# Altium footprint library PCB_IntegratedCircuit.PcbLib: 62 footprints (part 3 of 4)
Each footprint in its own frame and in the unit in brackets; x right, y up, seen from the top. Pads: shape width x height; smd on the part's side, far side on the other; paste and mask are expansions set on the pad; w line width, h text height; cw(c..) or ccw(c..) is an arc to the next point about the centre after c.
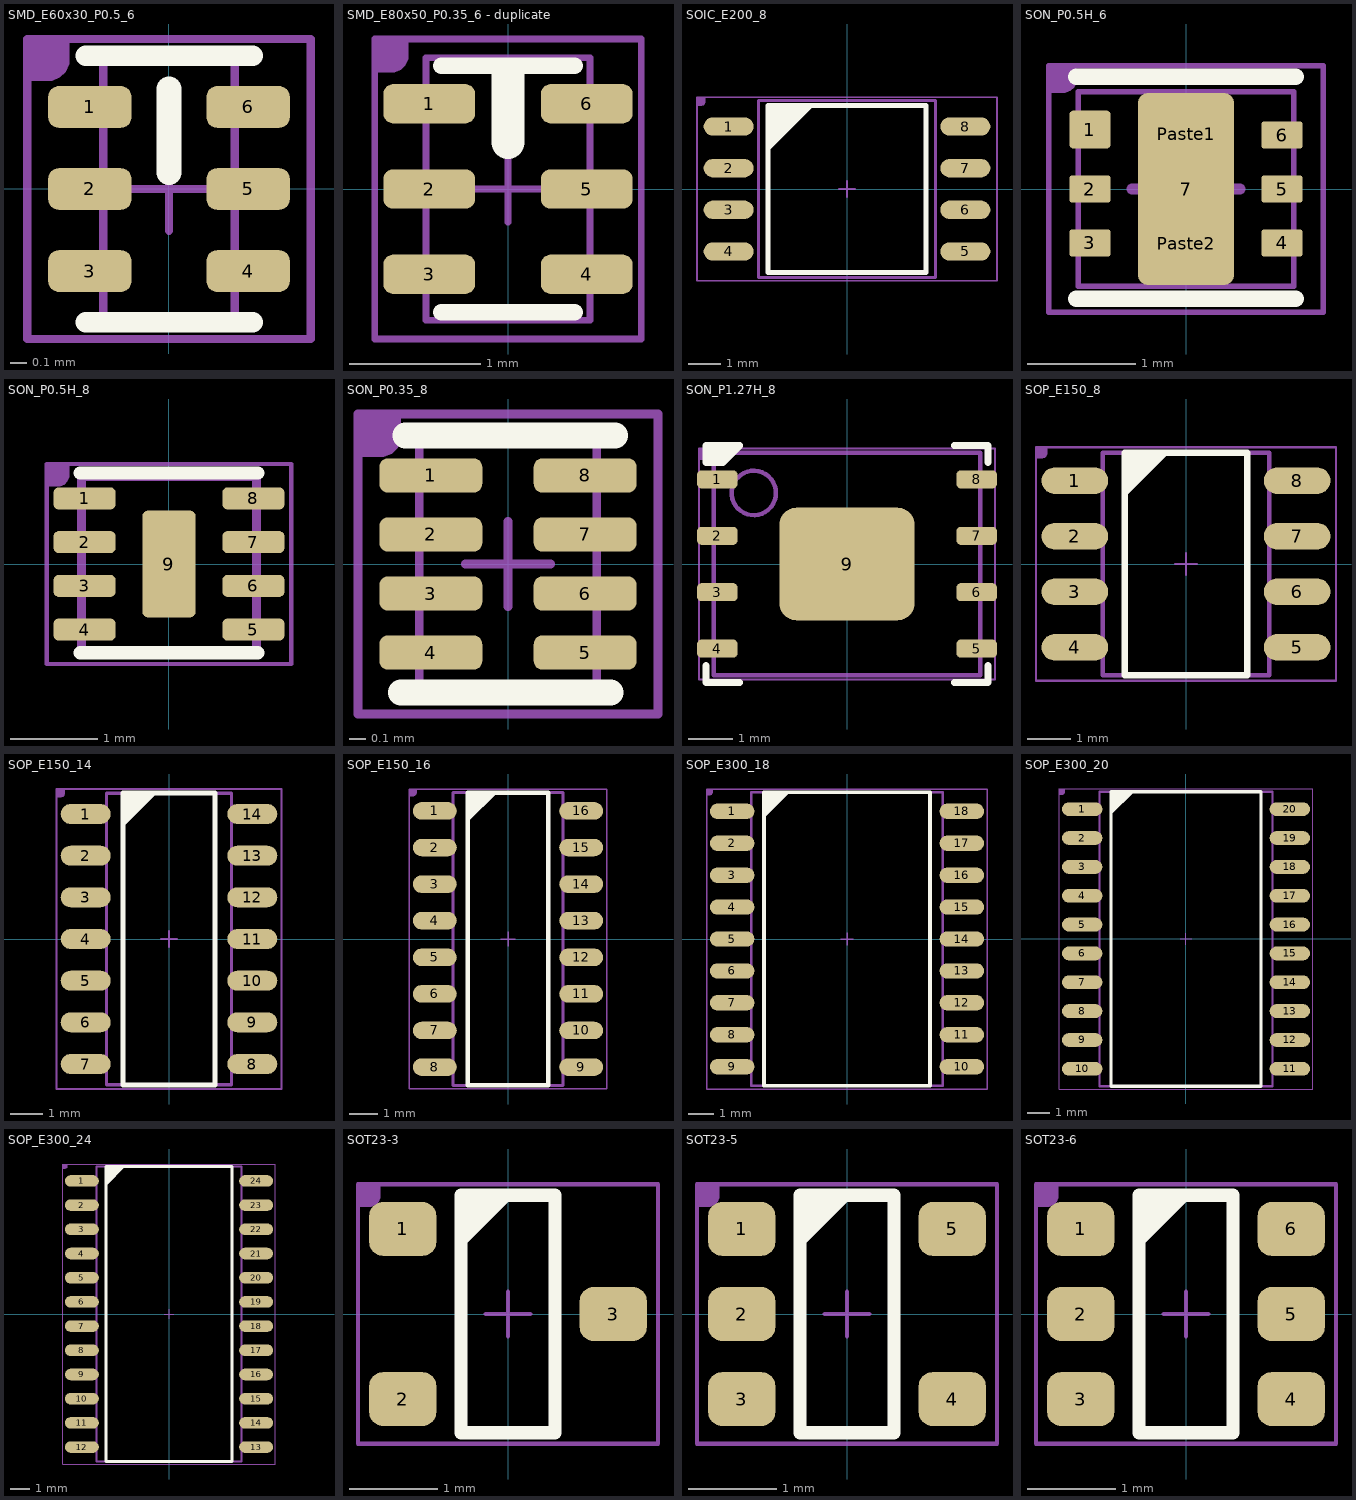
[diagram p2: the footprints below, top view; thin cyan lines are the x and y axes]

## SMD_E60x30_P0.5_6 [mil]
pads (6):
  rrect50% 20x10 smd: 1(-19,19.69) 2(-19,0) 3(-19,-19.68) 4(19,-19.68) 5(19,0) 6(19,19.69)
Top Overlay:
  lines w5: -20,-32 20,-32 ; -20,32 20,32
  lines w6: 0,4 0,24
Mechanical 13:
  lines w2: -10,0 10,0 ; 0,-10 0,10 ; 15.75,-31.5 15.75,31.5 -15.75,31.5 -15.75,-31.5 15.75,-31.5 ; 15.75,-31.5 15.75,-31.5
T-Component:
  region: -34,36 -24,36 -24,31 -24,30.01 -24.76,28.17 -26.17,26.76 -28.01,26 -29,26 -34,26
  lines w2: -34,-36 -34,36 34,36 34,-36 -34,-36
  text ".Designator" at -25,-15 h60
3D body: height 24.41, standoff 0, extent -15.95,-23.62 -10.04,-15.74
3D body: height 24.41, standoff 0, extent -1.38,15.75 1.77,23.63
3D body: height 24.41, standoff 0, extent 10.42,15.75 16.33,23.62
3D body: height 24.41, standoff 0, extent 10.42,-3.94 16.33,3.94
3D body: height 24.41, standoff 0, extent 10.42,-23.62 16.33,-15.75
3D body: height 24.41, standoff 0, extent -15.95,-3.93 -10.04,3.94
3D body: height 24.41, standoff 0, extent -15.95,15.76 -10.04,23.63
3D body: height 23.62, standoff 0, extent -15.75,-31.49 15.74,31.5

## SMD_E80x50_P0.35_6 - duplicate [mm]
pads (6):
  rrect50% 0.7x0.3 smd mask+0.05: 1(-0.6,0.65) 2(-0.6,0) 3(-0.6,-0.65) 4(0.6,-0.65) 5(0.6,0) 6(0.6,0.65)
Top Overlay:
  lines w0.127: -0.508,-0.94 0.508,-0.94 ; -0.508,0.94 0.508,0.94
  lines w0.254: 0,0.356 0,0.864
Mechanical 13:
  lines w0.051: -0.625,-1 0.625,-1 0.625,1 ; -0.254,0 0.254,0 ; 0,-0.254 0,0.254 ; -0.625,1 -0.625,-1 -0.625,1 ; -0.625,1 0.625,1 ; -0.625,1 0.625,1
T-Component:
  region: -1.016,1.143 -0.762,1.143 -0.762,1.016 -0.762,0.991 -0.781,0.944 -0.817,0.908 -0.864,0.889 -0.889,0.889 -1.016,0.889
  lines w0.051: -1.016,-1.143 -1.016,1.143 1.016,1.143 1.016,-1.143 -1.016,-1.143
  text ".Designator" at -0.635,-0.381 h1.52
3D body "User Library-1600BL15B100E.STEP": height 0.87, standoff 0.01, extent -0.635,-1 0.635,1

## SOIC_E200_8 [mil]
height 85.04
pads (8):
  oval 60x22 smd: 1(-142,75) 2(-142,25) 3(-142,-25) 4(-142,-75) 5(142,-75) 6(142,-25) 7(142,25) 8(142,75)
Top Overlay:
  region: -95,100 -40,100 -95,45
  lines w6: -95,-100 95,-100 95,100 -95,100 -95,-100
Mechanical 13:
  lines w2: -10,0 10,0 ; 0,-10 0,10
  lines w4: -106.3,-106.3 106.3,-106.3 106.3,106.3 -106.3,106.3 -106.3,-106.3
T-Component:
  region: -180,110 -170,110 -170,105 -170,104.01 -170.76,102.17 -172.17,100.76 -174.01,100 -175,100 -180,100
  lines w2: -180,-110 -180,110 180,110 180,-110 -180,-110
  text ".Designator" at -41,-25 h100
3D body "User Library-SOIC-8-208.STEP": height 84.37, standoff -0.28, extent -161.42,-106.29 161.42,106.3

## SON_P0.5H_6 [mil]
height 39.37
pads (9):
  rrect20% 15x13.78 smd: 1(-35,21.65)
  rrect20% 15x10 smd: 2(-35,0) 3(-35,-19.69) 4(35,-19.69) 5(35,0) 6(35,19.68)
  rrect20% 35x70 smd paste-100: 7(0,0)
  rrect20% 30x15 on Top Paste mask+1.97: Paste1(0,20) Paste2(0,-20)
Top Overlay:
  lines w6: -40,-40 40,-40 ; -40,41 40,41
Top Solder:
  region: -43,19.69 -43,-19.68 -27,-19.68 -27,19.69
  region: 27,19.69 27,-19.68 43,-19.68 43,19.69
Mechanical 13:
  lines w2: -39.37,-35.43 -39.37,35.43 39.37,35.43 39.37,-35.43 -39.37,-35.43
T-Component:
  region: -50,45 -40,45 -40,40 -40,39.01 -40.76,37.17 -42.17,35.76 -44.01,35 -45,35 -50,35
  lines w1.97: -50,-45 -50,45 50,45 50,-45 -50,-45
  text ".Designator" at -41,-25 h100
B-Component:
  lines w3.94: -19.68,0 19.69,0 ; 0,-19.69 0,19.68
3D body "PSON50P200X100_HS-7N.step": height 39.37, standoff -0.04, extent -39.41,-35.43 39.41,35.43

## SON_P0.5H_8 [mil] "SON, 8-Leads, Body 2.00x2.00mm, Pitch"
height 35.43
pads (9):
  rrect50% 28x10 smd mask+2: 1(-38,29.53) 2(-38,9.84) 3(-38,-9.84) 4(-38,-29.53) 5(38,-29.53) 6(38,-9.84) 7(38,9.84) 8(38,29.53)
  rrect20% 24x48 smd mask+2: 9(0,0)
Top Overlay:
  lines w6: -40,-40 40,-40 ; -40,41 40,41
Top Solder:
  region: -52,29.53 -52,-29.53 -24,-29.53 -24,29.53
  region: 52,-29.53 52,29.53 24,29.53 24,-29.53
Mechanical 13:
  lines w2: -10,0 10,0 ; 0,-10 0,10
  lines w3.94: -39.37,-39.37 -39.37,39.37 39.37,39.37 39.37,-39.37 -39.37,-39.37
T-Component:
  region: -55,45 -45,45 -45,40 -45,39.01 -45.76,37.17 -47.17,35.76 -49.01,35 -50,35 -55,35
  lines w1.97: -55,-45 55,-45 55,45 -55,45 -55,-45
  text ".Designator" at -41,-25 h100
3D body "SON50P200X90_HS-9L.step": height 35.43, standoff -0.04, extent -39.41,-39.37 39.41,39.37

## SON_P0.35_8 [mil] "SON, 8-Leads, Body 1.40x1.00mm, Pitch 0.35mm, IPC High Density"
height 15.75
pads (8):
  rrect50% 24x8 smd: 1(-18,20.67) 2(-18,6.89) 3(-18,-6.89) 4(-18,-20.67) 5(18,-20.67) 6(18,-6.89) 7(18,6.89) 8(18,20.67)
Top Layer:
  region: -18,20.67
Top Overlay:
  lines w6: -25,-30 24,-30 ; -24,30 25,30
Top Solder:
  region: -30,20.67 -6,20.67 -6,-20.67 -30,-20.67
  region: 6,20.67 30,20.67 30,-20.67 6,-20.67
Mechanical 13:
  lines w2: -10,0 10,0 ; 0,-10 0,10 ; -20.67,-28.54 -20.67,28.54 20.67,28.54 20.67,-28.54 -20.67,-28.54
T-Component:
  region: -35,35 -25,35 -25,30 -25,29.01 -25.76,27.17 -27.17,25.76 -29.01,25 -30,25 -35,25
  lines w2: -35,-35 35,-35 35,35 -35,35 -35,-35
  text ".Designator" at -25.76,-16 h60
3D body "SON35P100X40-8L.step": height 15.75, standoff 0, extent -22.64,-28.54 22.64,28.54

## SON_P1.27H_8 [mil] "SON, 8-Leads, Body 5.00x6.00mm, Pitch 1.27mm, Thermal Pad 3.40x4.30mm, IPC High Density"
height 29.53
pads (9):
  rrect50% 36x16 smd: 1(-115,75) 2(-115,25) 3(-115,-25) 4(-115,-75) 5(115,-75) 6(115,-25) 7(115,25) 8(115,75)
  rrect30% 120x100 smd paste-84.65: 9(0,0)
Top Overlay:
  region: -125,105 -95,105 -110,90 -125,90
  lines w6: -125,-90 -125,-105 -95,-105 ; 95,-105 125,-105 125,-90 ; 95,105 125,105 125,90 ; -125,90 -110,90 -95,105 -125,105 -125,90
Top Paste:
  rectangle: -24.21,-18.31 24.21,18.31
Mechanical 13:
  circle w3.94: c-82.68,62.99 r19.68
  lines w4: -19.68,0 19.69,0 ; 0,-19.68 0,19.68 ; -118.11,-98.43 118.11,-98.43 118.11,98.43 -118.11,98.43 -118.11,-98.43
T-Component:
  region: -131.3,102.36 -121.3,102.36 -121.3,97.36 -121.3,96.37 -122.06,94.53 -123.47,93.12 -125.3,92.36 -126.3,92.36 -131.3,92.36
  lines w2: -131.3,-102.36 131.3,-102.36 131.3,102.36 -131.3,102.36 -131.3,-102.36
  text ".Designator" at -41,-25 h100
3D body "SON127P600X75_HS-9L.step": height 29.53, standoff 0, extent -118.9,-98.43 118.9,98.43

## SOP_E150_8 [mil]
height 68.9
pads (8):
  oval 60x24 smd: 1(-100,75) 2(-100,25) 3(-100,-25) 4(-100,-75) 5(100,-75) 6(100,-25) 7(100,25) 8(100,75)
Top Overlay:
  region: -55,100 -15,100 -55,60
  lines w6: -55,-100 -55,100 55,100 55,-100 -55,-100
Mechanical 13:
  lines w2: -10,0 10,0 ; 0,-10 0,10
  lines w4: -75,-100 75,-100 75,100 -75,100 -75,-100
T-Component:
  region: -135,105 -125,105 -125,100 -125,99.01 -125.76,97.17 -127.17,95.76 -129.01,95 -130,95 -135,95
  lines w2: -135,-105 -135,105 135,105 135,-105 -135,-105
  text ".Designator" at -41,-25 h100
3D body "User Library-SOIC-8-1.STEP": height 68.9, standoff 0, extent -118.1,-96.46 118.12,96.46

## SOP_E150_14 [mil]
height 68.9
pads (14):
  oval 60x24 smd: 1(-100,150) 2(-100,100) 3(-100,50) 4(-100,0) 5(-100,-50) 6(-100,-100) 7(-100,-150) 8(100,-150) 9(100,-100) 10(100,-50) 11(100,0) 12(100,50) 13(100,100) 14(100,150)
Top Overlay:
  region: -55,175 -15,175 -55,135
  lines w6: -55,-175 55,-175 55,175 -55,175 -55,-175
Mechanical 13:
  lines w2: -10,0 10,0 ; 0,-10 0,10
  lines w4: -75,-175 -75,175 75,175 75,-175 -75,-175
T-Component:
  region: -135,180 -125,180 -125,175 -125,174.01 -125.76,172.17 -127.17,170.76 -129.01,170 -130,170 -135,170
  lines w2: -135,-180 135,-180 135,180 -135,180 -135,-180
  text ".Designator" at -41,-25 h100
3D body "User Library-SOIC-14.STEP": height 68.9, standoff 0, extent -118.1,-172.24 118.11,172.25

## SOP_E150_16 [mil]
height 68.9
pads (16):
  oval 60x24 smd: 1(-100,175) 2(-100,125) 3(-100,75) 4(-100,25) 5(-100,-25) 6(-100,-75) 7(-100,-125) 8(-100,-175) 9(100,-175) 10(100,-125) 11(100,-75) 12(100,-25) 13(100,25) 14(100,75) 15(100,125) 16(100,175)
Top Overlay:
  region: -55,200 -15,200 -55,160
  lines w6: -55,-200 -55,200 55,200 55,-200 -55,-200
Mechanical 13:
  lines w2: -10,0 10,0 ; 0,-10 0,10
  lines w4: -75,-200 75,-200 75,200 -75,200 -75,-200
T-Component:
  region: -135,205 -125,205 -125,200 -125,199.01 -125.76,197.17 -127.17,195.76 -129.01,195 -130,195 -135,195
  lines w2: -135,-205 -135,205 135,205 135,-205 -135,-205
  text ".Designator" at -41,-25 h100
3D body "User Library-SOIC-16-2.STEP": height 68.9, standoff 0, extent -118.1,-196.85 118.11,196.85

## SOP_E300_18 [mil]
height 104.33
pads (18):
  oval 70x24 smd: 1(-180,200) 2(-180,150) 3(-180,100) 4(-180,50) 5(-180,0) 6(-180,-50) 7(-180,-100) 8(-180,-150) 9(-180,-200) 10(180,-200) 11(180,-150) 12(180,-100) 13(180,-50) 14(180,0) 15(180,50) 16(180,100) 17(180,150) 18(180,200)
Top Overlay:
  region: -130,230 -90,230 -130,190
  lines w6: -130,-230 -130,230 130,230 130,-230 -130,-230
Mechanical 13:
  lines w2: -10,0 10,0 ; 0,-10 0,10
  lines w4: -150,-230 -150,230 150,230 150,-230 -150,-230
T-Component:
  region: -220,235 -210,235 -210,230 -210,229.01 -210.76,227.17 -212.17,225.76 -214.01,225 -215,225 -220,225
  lines w2: -220,-235 220,-235 220,235 -220,235 -220,-235
  text ".Designator" at -41,-25 h100
3D body "User Library-SOIC-18-300.STEP": height 101.26, standoff -1.1, extent -208.66,-231.29 208.66,231.31

## SOP_E300_20 [mil]
height 104.33
pads (20):
  oval 70x24 smd: 1(-180,225) 2(-180,175) 3(-180,125) 4(-180,75) 5(-180,25) 6(-180,-25) 7(-180,-75) 8(-180,-125) 9(-180,-175) 10(-180,-225) 11(180,-225) 12(180,-175) 13(180,-125) 14(180,-75) 15(180,-25) 16(180,25) 17(180,75) 18(180,125) 19(180,175) 20(180,225)
Top Overlay:
  region: -130,255 -90,255 -130,215
  lines w6: -130,-255 130,-255 130,255 -130,255 -130,-255
Mechanical 13:
  lines w2: -10,0 10,0 ; 0,-10 0,10
  lines w4: -150,-255 150,-255 150,255 -150,255 -150,-255
T-Component:
  region: -220,260 -210,260 -210,255 -210,254.01 -210.76,252.17 -212.17,250.76 -214.01,250 -215,250 -220,250
  lines w2: -220,-260 -220,260 220,260 220,-260 -220,-260
  text ".Designator" at -41,-25 h100
3D body "User Library-SOIC-20-300.STEP": height 101.26, standoff -1.1, extent -208.66,-255.9 208.66,255.91

## SOP_E300_24 [mil]
height 104.33
pads (24):
  oval 70x24 smd: 1(-180,275) 2(-180,225) 3(-180,175) 4(-180,125) 5(-180,75) 6(-180,25) 7(-180,-25) 8(-180,-75) 9(-180,-125) 10(-180,-175) 11(-180,-225) 12(-180,-275) 13(180,-275) 14(180,-225) 15(180,-175) 16(180,-125) 17(180,-75) 18(180,-25) 19(180,25) 20(180,75) 21(180,125) 22(180,175) 23(180,225) 24(180,275)
Top Overlay:
  region: -130,305 -90,305 -130,265
  lines w6: -130,-305 -130,305 130,305 130,-305 -130,-305
Mechanical 13:
  lines w2: -10,0 10,0 ; 0,-10 0,10
  lines w4: -150,-305 -150,305 150,305 150,-305 -150,-305
T-Component:
  region: -220,310 -210,310 -210,305 -210,304.01 -210.76,302.17 -212.17,300.76 -214.01,300 -215,300 -220,300
  lines w2: -220,-310 -220,310 220,310 220,-310 -220,-310
  text ".Designator" at -41,-25 h100
3D body "User Library-SOIC_24.STEP": height 102.36, standoff 0, extent -204.72,-308.46 204.73,297.84

## SOT23-3 [mil]
height 39.5
pads (3):
  rrect50% 30x24 smd: 1(-47,38) 2(-47,-38) 3(47,0)
Top Overlay:
  region: -21,53 3,53 -21,29
  lines w6: -21,-53 -21,53 21,53 21,-53 -21,-53
Mechanical 13:
  lines w2: -10,0 10,0 ; 0,-10 0,10
T-Component:
  region: -67,58 -57,58 -57,53 -57,52.01 -57.76,50.17 -59.17,48.76 -61.01,48 -62,48 -67,48
  lines w2: -67,-58 -67,58 67,58 67,-58 -67,-58
  text ".Designator" at -41,-25 h100
3D body "User Library-SOT23-3.STEP": height 51.18, standoff 0, extent -55.11,-57.09 55.12,57.09

## SOT23-5 [mil]
height 62.99
pads (5):
  rrect50% 30x24 smd: 1(-47,38) 2(-47,0) 3(-47,-38) 4(47,-38) 5(47,38)
Top Overlay:
  region: -21,53 3,53 -21,29
  lines w6: -21,-53 -21,53 21,53 21,-53 -21,-53
Mechanical 13:
  lines w2: -10,0 10,0 ; 0,-10 0,10
T-Component:
  region: -67,58 -57,58 -57,53 -57,52.01 -57.76,50.17 -59.17,48.76 -61.01,48 -62,48 -67,48
  lines w2: -67,-58 67,-58 67,58 -67,58 -67,-58
  text ".Designator" at -41,-25 h100
3D body "User Library-SOT23-5-2.STEP": height 57.09, standoff 0, extent -55.11,-57.09 55.12,57.09

## SOT23-6 [mil]
height 62.99
pads (6):
  rrect50% 30x24 smd: 1(-47,38) 2(-47,0) 3(-47,-38) 4(47,-38) 5(47,0) 6(47,38)
Top Overlay:
  region: -21,53 3,53 -21,29
  lines w6: -21,-53 -21,53 21,53 21,-53 -21,-53
Mechanical 13:
  lines w2: -10,0 10,0 ; 0,-10 0,10
T-Component:
  region: -67,58 -57,58 -57,53 -57,52.01 -57.76,50.17 -59.17,48.76 -61.01,48 -62,48 -67,48
  lines w2: -67,-58 -67,58 67,58 67,-58 -67,-58
  text ".Designator" at -41,-25 h100
3D body "User Library-SOT23-6-2.STEP": height 57.09, standoff 0, extent -55.11,-57.09 55.12,57.09